# Altium schematic symbol library 101D-TAAB-R01.SchLib: 1 symbol
Pins are listed as number, name and electrical type; pins without a type are passive.

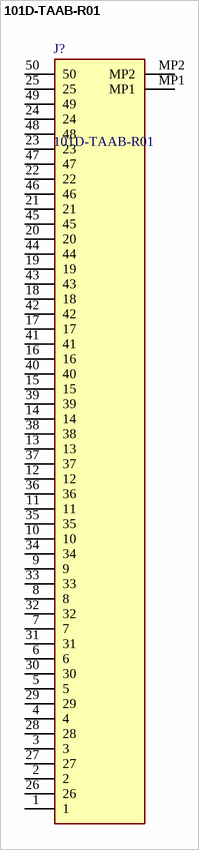
[diagram p0: symbol 101D-TAAB-R01]

## 101D-TAAB-R01
designator J?
Connector: for cards; Compact Flash; SMT; gold flash; LCP; 40m; Manufacturer_Name: ATTEND; Geometry.Height: 4.05mm; TME Electronic Components Part Number: *; TME Electronic Components Price/Stock: *; Manufacturer_Part_Number: 101D-TAAB-R01; Datasheet Link: https://cdn.ozdisan.com/ETicaret_Dosya/585481_4595843.PDF
footprint 101DTAABR01
pins: 1, 2, 3, 4, 5, 6, 7, 8, 9, 10, 11, 12, 13, 14, 15, 16, 17, 18, 19, 20, 21, 22, 23, 24, 25, 26, 27, 28, 29, 30, 31, 32, 33, 34, 35, 36, 37, 38, 39, 40, 41, 42, 43, 44, 45, 46, 47, 48, 49, 50, MP1, MP2